# Altium schematic symbol library LM7905CT.SchLib: 1 symbol
Pins are listed as number, name and electrical type; pins without a type are passive.

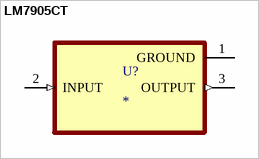
[diagram p0: symbol LM7905CT]

## LM7905CT
designator U?
1.5-A, negative linear voltage regulator 3-TO-220 0 to 125; MF: Texas Instruments; MP: LM7905CT; SnapEDA_Link: https://www.snapeda.com/parts/LM7905CT/Texas+Instruments/view-part/?ref=snap; Package: TO-220-3 Texas Instruments; Value: *; Check_prices: https://www.snapeda.com/parts/LM7905CT/Texas+Instruments/view-part/?ref=eda
footprint TO254P1054X470X1955-3
pins: 1 GROUND (power), 2 INPUT (in), 3 OUTPUT (out)